# Altium schematic symbol library UCP.SchLib: 378 symbols (part 3 of 14)
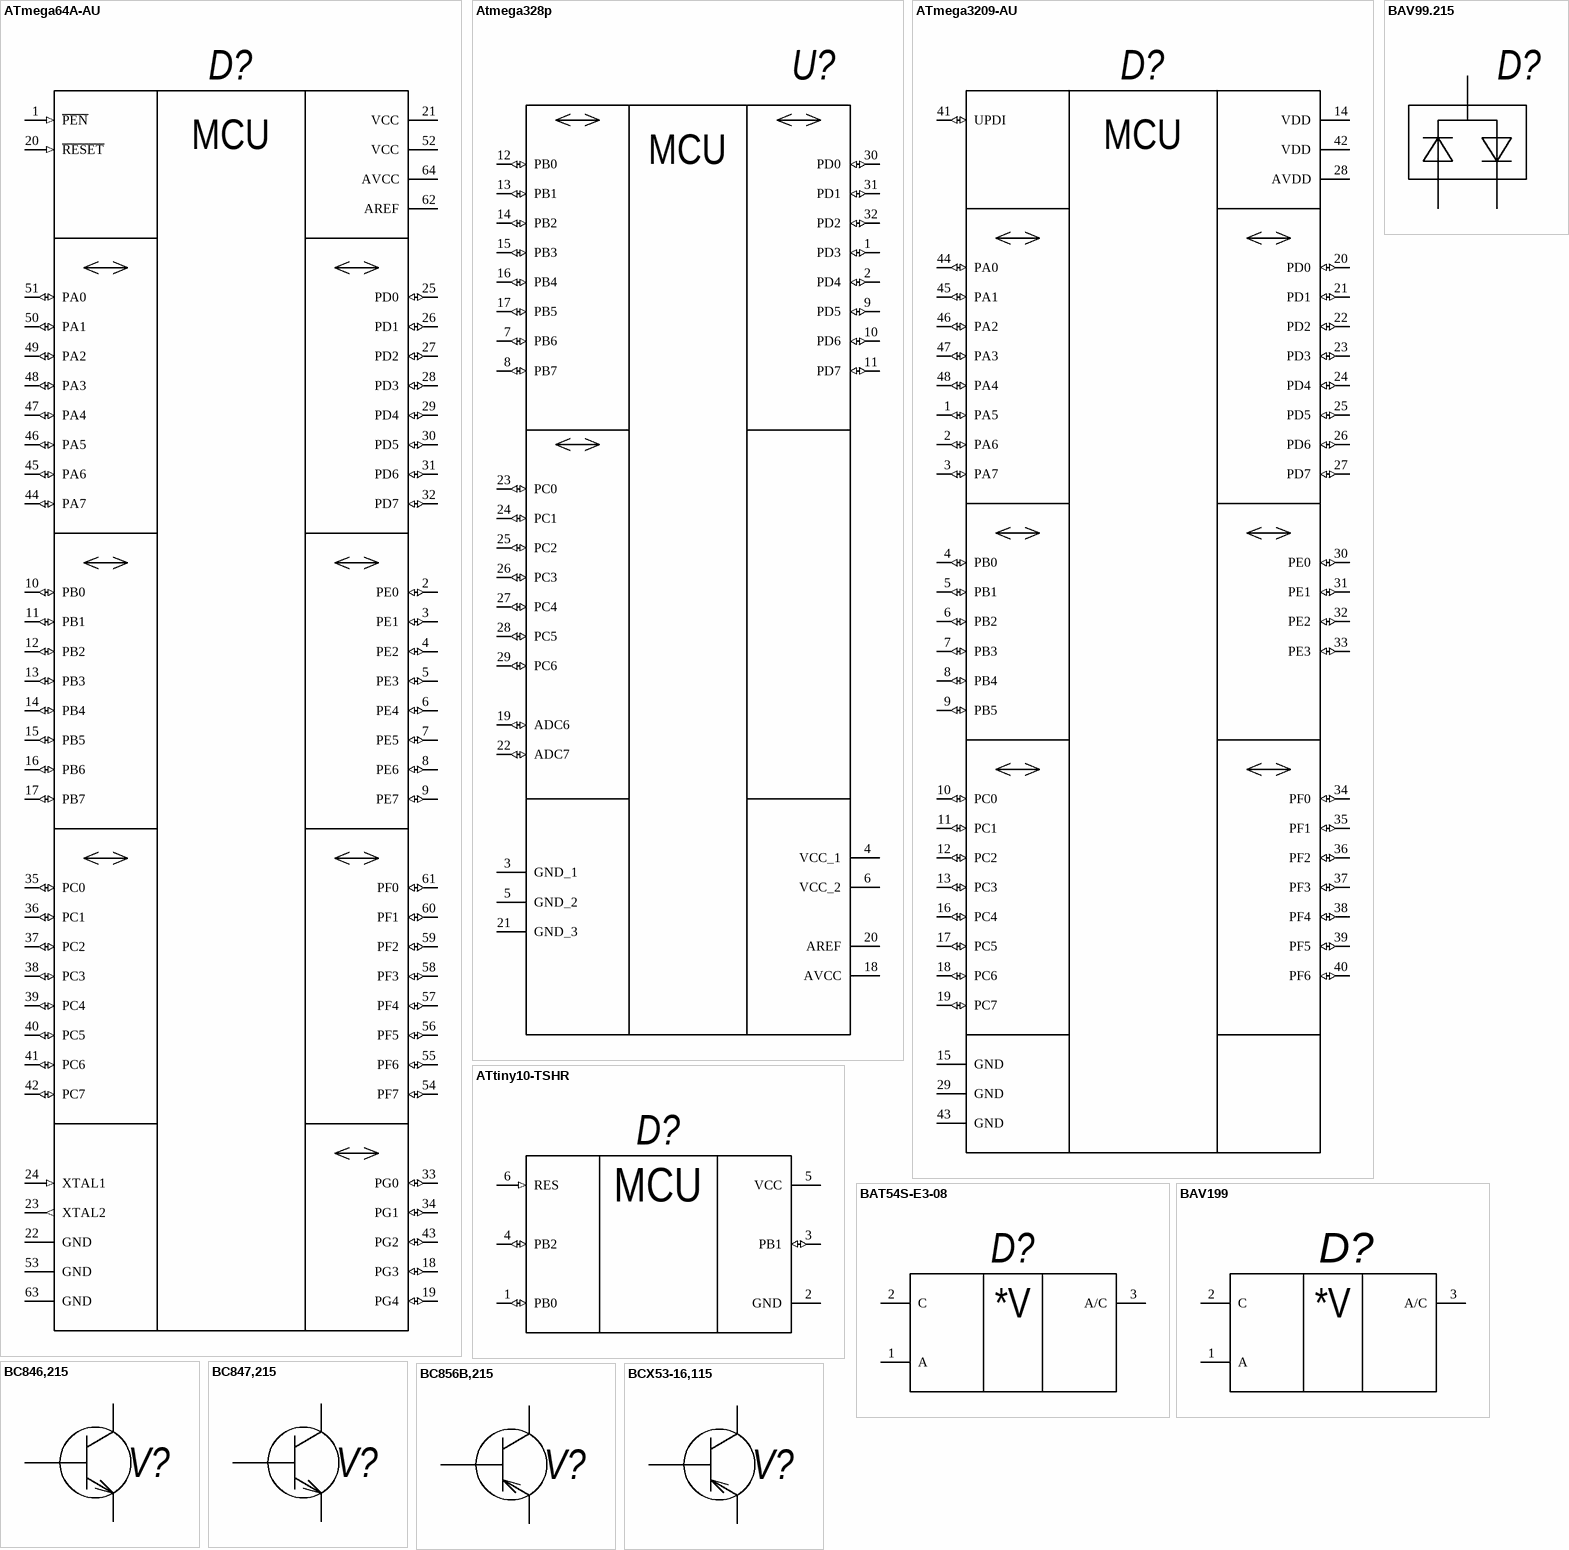
[diagram p26: symbols ATmega64A-AU to BCX53-16,115]

## BAV199
designator D?  (value not drawn)
Small Signal Diode, Dual Isolated, 85 V, 160 Ma, 1.1 V, 3 S, 4.5 A Rohs Compliant: Yes; Manufacturer 1: Infineon; Forward Current: 200mA; Max Repetitive Reverse Voltage (Vrrm): 75V; Reverse Recovery Time: 600ns; Forward Voltage: 1.1V; Max Power Dissipation: 330mW; Max Forward Surge Current (Ifsm): 4.5A; Breakdown Voltage: 85V; Type: Микросхема; Manufacturer Part Number 1: BAV199; RoHS: Yes; Category: Rectifier Diodes; Stock 1: 442765; Pricing 1: 3000=0,04602, 6000=0,04002, 15000=0,03480 (USD); Case/Package: SOT-23-3; Number of Pins: 3; Max Operating Temperature: 150°C; Packaging: Tape and Reel; Termination: SMD/SMT; Voltage: 85V; REACH SVHC: No SVHC; ComponentLink1URL: https://datasheet.ciiva.com/1180/48082-1180489.pdf?src-supplier=Element14; ComponentLink1Description: https://datasheet.ciiva.com/1180/48082-1180489.pdf?src-supplier=Element14; ComponentLink2URL: https://datasheet.ciiva.com/14174/qi600123-e-14174045.pdf?src-supplier=Distrelec; ComponentLink2Description: https://datasheet.ciiva.com/14174/qi600123-e-14174045.pdf?src-supplier=Distrelec; ComponentLink3URL: https://datasheet.ciiva.com/1180/23073-1180485.pdf?src-supplier=Element14; ComponentLink3Description: https://datasheet.ciiva.com/1180/23073-1180485.pdf?src-supplier=Element14; Supplier 1: Digi-Key; Supplier Part Number 1: BAV199E6327HTSA1CT-ND; Mount: SMT; Value: BAV199
footprint SOT23-3P95_240X110L25X60N (Small Outline Transistor (SOT23), 0.95 mm pitch; 3 pin, 2.90 mm L X 1.30 mm W X 1.10 mm H body)
footprint SOT23-3P95_240X110L30X43N (Small Outline Transistor (SOT23), 0.95 mm pitch; 3 pin, 2.90 mm L X 1.30 mm W X 1.10 mm H body)
pins: 1 A, 2 C, 3 A/C
text: *V

## BC846,215
designator V?  (value not drawn)
BC846 Series 65 V 100 mA SMT NPN General Purpose Transistor - SOT-23; Manufacturer 1: Nexperia; Supplier 1: RSComponents; Manufacturer Part Number 1: BC846,215; RoHS: Yes; Category: BJTs; Stock 1: 1; Pricing 1: 50=0,14700, 100=0,04900, 250=0,04800, 500=0,04500, 1000=0,03200 (USD); RoHS Compliant: Yes; ComponentLink1URL: http://www.farnell.com/datasheets/1699731.pdf?src-supplier=Farnell; ComponentLink1Description: http://www.farnell.com/datasheets/1699731.pdf?src-supplier=Farnell; ComponentLink2URL: https://assets.nexperia.com/documents/data-sheet/BC846_SER.pdf?src-supplier=Digi-Key; ComponentLink2Description: https://assets.nexperia.com/documents/data-sheet/BC846_SER.pdf?src-supplier=Digi-Key; Supplier Part Number 1: 4842268; Case/Package: SOT-23-3; Mount: SMT; Type: Транзистор; Value: BC846
footprint SOT23-3P95_240X110L25X60N (Small Outline Transistor (SOT23), 0.95 mm pitch; 3 pin, 2.90 mm L X 1.30 mm W X 1.10 mm H body)
footprint SOT23-3P95_240X110L30X43N (Small Outline Transistor (SOT23), 0.95 mm pitch; 3 pin, 2.90 mm L X 1.30 mm W X 1.10 mm H body)
pins: 1 B, 2 E, 3 C

## BC847,215
designator V?, comment BC847  (value not drawn)
TRANS NPN 45V 0.1A SOT23; Manufacturer 1: Nexperia; Manufacturer Part Number 1: BC847,215; RoHS: Yes; Category: BJTs; Stock 1: 1; Pricing 1: 50=0,13300 (USD); RoHS Compliant: Yes; ComponentLink1URL: http://www.farnell.com/datasheets/1699731.pdf?src-supplier=Farnell; ComponentLink1Description: http://www.farnell.com/datasheets/1699731.pdf?src-supplier=Farnell; ComponentLink2URL: https://assets.nexperia.com/documents/data-sheet/BC846_SER.pdf?src-supplier=Digi-Key; ComponentLink2Description: https://assets.nexperia.com/documents/data-sheet/BC846_SER.pdf?src-supplier=Digi-Key; Supplier 1: RSComponents; Supplier Part Number 1: 4367953; ComponentLink3URL: http://www.farnell.com/datasheets/1856333.pdf?src-supplier=Farnell; ComponentLink3Description: http://www.farnell.com/datasheets/1856333.pdf?src-supplier=Farnell; ComponentLink4URL: https://assets.nexperia.com/documents/data-sheet/BC847_SER.pdf?src-supplier=Digi-Key; ComponentLink4Description: https://assets.nexperia.com/documents/data-sheet/BC847_SER.pdf?src-supplier=Digi-Key; ComponentLink5URL: http://www.farnell.com/datasheets/1856333.pdf?src-supplier=Newark; ComponentLink5Description: http://www.farnell.com/datasheets/1856333.pdf?src-supplier=Newark; ComponentLink6URL: http://www.farnell.com/datasheets/1856333.pdf?src-supplier=Element14; ComponentLink6Description: http://www.farnell.com/datasheets/1856333.pdf?src-supplier=Element14; Case/Package: SOT-23-3; Mount: SMT; Type: Транзистор; Value: BC847
footprint SOT23-3P95_240X110L25X60N (Small Outline Transistor (SOT23), 0.95 mm pitch; 3 pin, 2.90 mm L X 1.30 mm W X 1.10 mm H body)
footprint SOT23-3P95_240X110L30X43N (Small Outline Transistor (SOT23), 0.95 mm pitch; 3 pin, 2.90 mm L X 1.30 mm W X 1.10 mm H body)
pins: 1 B, 2 E, 3 C

## BC856B,215
designator V?  (value not drawn)
Transistor General Purpose BJT PNP 65 Volt 0.2 Amp 3-Pin TO-236AB Tape and Reel; Manufacturer 1: Nexperia USA; Value: BC856; Supplier 1: Mouser; Manufacturer Part Number 1: BC856B,215; RoHS: No; Category: BJTs; Stock 1: 11364; Pricing 1: 1=0,13000, 10=0,11000, 50=0,11000, 100=0,06000, 500=0,03900, 1000=0,02700, 3000=0,02100, 10000=0,02100 (USD); ComponentLink1URL: https://assets.nexperia.com/documents/data-sheet/BC856_BC857_BC858.pdf?src-supplier=Digi-Key; ComponentLink1Description: https://assets.nexperia.com/documents/data-sheet/BC856_BC857_BC858.pdf?src-supplier=Digi-Key; Supplier Part Number 1: 771-BC856B-T/R; Case/Package: SOT-23-3; Mount: SMT; Type: Транзистор
footprint SOT23-3P95_240X110L25X60N (Small Outline Transistor (SOT23), 0.95 mm pitch; 3 pin, 2.90 mm L X 1.30 mm W X 1.10 mm H body)
footprint SOT23-3P95_240X110L30X43N (Small Outline Transistor (SOT23), 0.95 mm pitch; 3 pin, 2.90 mm L X 1.30 mm W X 1.10 mm H body)
pins: 1 B, 2 E, 3 C

## BCX53-16,115
designator V?  (value not drawn)
PNP Ic=-1A Vceo=-80V hfe=100~250 P=500mW; Manufacturer 1: Nexperia; Value: BCX53; Supplier 1: RSComponents; Supplier Part Number 1: 4368013; Manufacturer Part Number 1: BCX53-16,115; RoHS: Yes; Category: BJTs; Stock 1: 360; Pricing 1: 10=0,41900, 20=0,26800, 50=0,25900, 100=0,18400, 200=0,17600 (USD); RoHS Compliant: Yes; ComponentLink1URL: https://assets.nexperia.com/documents/data-sheet/BCP53_BCX53_BC53PA.pdf?src-supplier=Digi-Key; ComponentLink1Description: https://assets.nexperia.com/documents/data-sheet/BCP53_BCX53_BC53PA.pdf?src-supplier=Digi-Key; ComponentLink2URL: http://www.farnell.com/datasheets/1499214.pdf?src-supplier=Newark; ComponentLink2Description: http://www.farnell.com/datasheets/1499214.pdf?src-supplier=Newark; Case/Package: SOT-89; Mount: SMT; Type: Транзистор
footprint SOT89R-150P350X160-3N (SOT89, 3-Leads, Body 4,50x2,50mm, Pitch 1,50mm, Lead Span 3,5mm - Reverse Pinning, IPC Medium Density)
pins: 1 E, 2 C, 3 B

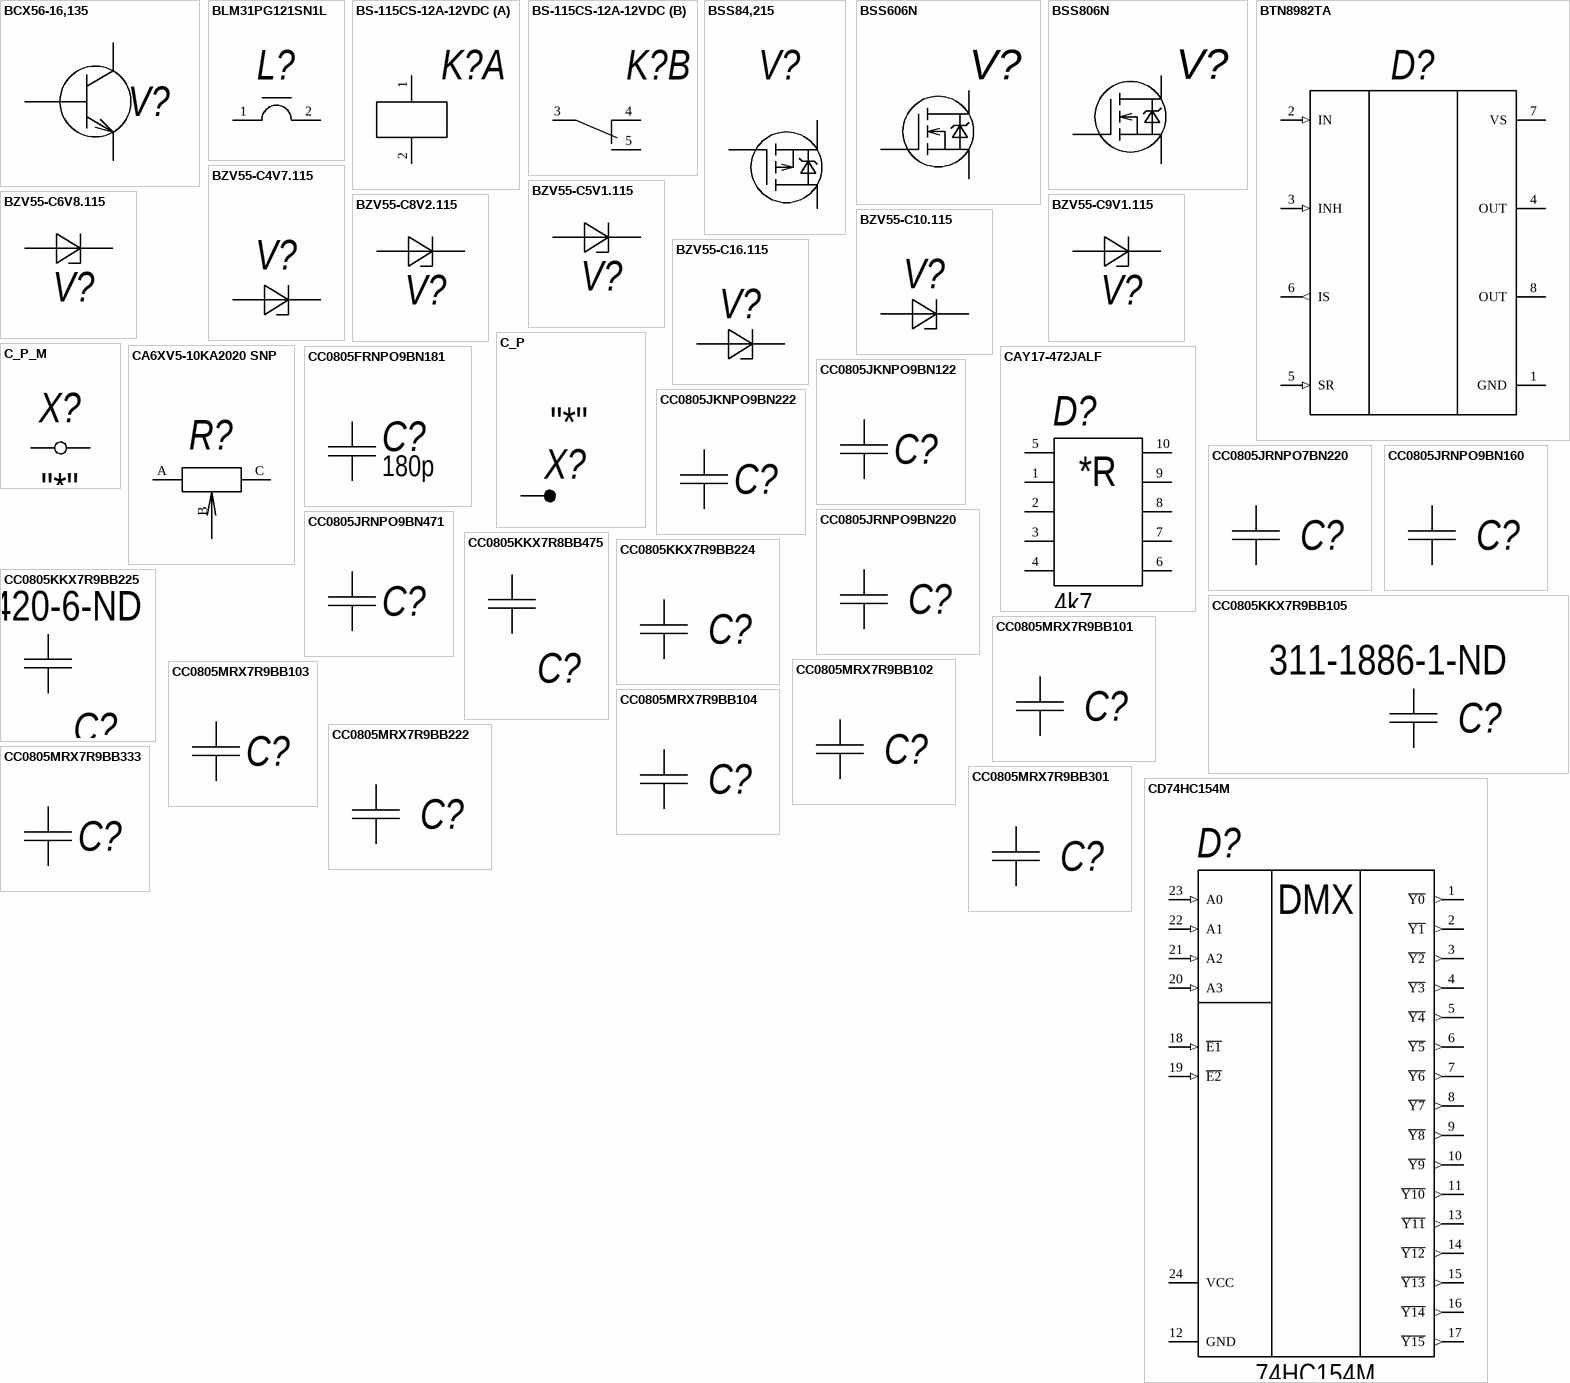
[diagram p6: symbols BCX56-16,135 to CD74HC154M]

## BCX56-16,135
designator V?  (value not drawn)
TRANS NPN 80V 1A SOT89; Manufacturer 1: Nexperia; Value: BCX56; Supplier 1: Digi-Key; Manufacturer Part Number 1: BCX56-16,135; RoHS: Yes; Category: BJTs; Stock 1: 2080; Pricing 1: 1=0,39000, 10=0,29200, 100=0,18170, 500=0,12430, 1000=0,09561, 2000=0,08605 (USD); ComponentLink1URL: https://assets.nexperia.com/documents/data-sheet/BCP56_BCX56_BC56PA.pdf?src-supplier=Digi-Key; ComponentLink1Description: https://assets.nexperia.com/documents/data-sheet/BCP56_BCX56_BC56PA.pdf?src-supplier=Digi-Key; Supplier Part Number 1: 1727-6389-1-ND; Case/Package: SOT-89; Mount: SMT; Type: Транзистор
footprint SOT89R-150P350X160-3N (SOT89, 3-Leads, Body 4,50x2,50mm, Pitch 1,50mm, Lead Span 3,5mm - Reverse Pinning, IPC Medium Density)
pins: 1 E, 2 C, 3 B

## BLM31PG121SN1L
designator L?  (value not drawn)
Ferrite Beads Multi-Layer 120Ohm 25% 100MHz 3.5A 20mOhm DCR 1206 T/R; Material: Steel,Ferrite; Impedance: 120R; Number of Lines: 1; DC Resistance (DCR): 20mR; Max DC Current: 3A; Shielding: Unshielded; Value: FB1206; Type: Бусина ферритовая; Supplier 1: Digi-Key; Supplier Part Number 1: 732-1622-1-ND; Supplier 2: Farnell; Supplier Part Number 2: 2672838; Manufacturer 2: Murata; Manufacturer Part Number 2: BLM31PG121SN1L; RoHS 2: Yes; Category: Ferrite Beads and Chips; Stock 2: 408; Pricing 2: 5=0,23000, 50=0,14800, 250=0,12200, 500=0,09600, 1500=0,09450, 3000=0,09300, 15000=0,09110 (EUR); Case/Package: 1206; Number of Pins: 2; Core Material: Ferrite; Case Code (Metric): 3216; Case Code (Imperial): 1206; Contact Plating: Tin,Matte; Min Operating Temperature: -55°C; Max Operating Temperature: 125°C; Package Quantity: 3000; Tolerance: 25%; Max Current Rating: 3.5A; Packaging: Tape and Reel; Current Rating: 3.5A; Termination: SMD/SMT; Test Frequency: 100MHz; DC Current: 3A; Frequency: 100MHz; Length: 3.2mm; Width: 1.6mm; Height: 1.1mm; Depth: 1.6mm; Radiation Hardening: No; Military Standard: Not; Lead Free: Lead Free; RoHS Compliant: Yes; ComponentLink1URL: https://datasheet.ciiva.com/19460/1845419-19460234.pdf?src-supplier=Jameco; ComponentLink1Description: https://datasheet.ciiva.com/19460/1845419-19460234.pdf?src-supplier=Jameco; ComponentLink2URL: https://datasheet.ciiva.com/1012/l0132s0193blm31p-1012992.pdf?src-supplier=Digi-Key; ComponentLink2Description: https://datasheet.ciiva.com/1012/l0132s0193blm31p-1012992.pdf?src-supplier=Digi-Key; ComponentLink3URL: https://datasheet.ciiva.com/11799/0900766b811b5866-11799444.pdf?src-supplier=RSComponents; ComponentLink3Description: https://datasheet.ciiva.com/11799/0900766b811b5866-11799444.pdf?src-supplier=RSComponents; ComponentLink4URL: https://datasheet.ciiva.com/3081/l0110s0100blm31p-3081665.pdf?src-supplier=Avnet; ComponentLink4Description: https://datasheet.ciiva.com/3081/l0110s0100blm31p-3081665.pdf?src-supplier=Avnet; ComponentLink5URL: https://datasheet.ciiva.com/41449/001172383-da-01-en-drossel-1206-120r-3-2x1-60mm-3000st-41449554.pdf?src-supplier=Conrad; ComponentLink5Description: https://datasheet.ciiva.com/41449/001172383-da-01-en-drossel-1206-120r-3-2x1-60mm-3000st-41449554.pdf?src-supplier=Conrad; ComponentLink6URL: https://datasheet.ciiva.com/29348/442557-da-01-en-chip-drossel-1206-120r-3000ma-3-2x1-60mm-29348014.pdf?src-supplier=Conrad; ComponentLink6Description: https://datasheet.ciiva.com/29348/442557-da-01-en-chip-drossel-1206-120r-3000ma-3-2x1-60mm-29348014.pdf?src-supplier=Conrad; ComponentLink7URL: https://datasheet.ciiva.com/14122/apblm31p-data-e-14122856.pdf?src-supplier=Distrelec; ComponentLink7Description: https://datasheet.ciiva.com/14122/apblm31p-data-e-14122856.pdf?src-supplier=Distrelec; ComponentLink8URL: https://datasheet.ciiva.com/48436/blm31pg121sn1l-eng-tds-48436731.pdf?src-supplier=Distrelec; ComponentLink8Description: https://datasheet.ciiva.com/48436/blm31pg121sn1l-eng-tds-48436731.pdf?src-supplier=Distrelec; ComponentLink9URL: https://datasheet.ciiva.com/1012/l0110s0100blm31p-1012991.pdf?src-supplier=Digi-Key; ComponentLink9Description: https://datasheet.ciiva.com/1012/l0110s0100blm31p-1012991.pdf?src-supplier=Digi-Key; ComponentLink10URL: https://datasheet.ciiva.com/1012/l0110s0100blm31p-1012993.pdf?src-supplier=Digi-Key; ComponentLink10Description: https://datasheet.ciiva.com/1012/l0110s0100blm31p-1012993.pdf?src-supplier=Digi-Key; ComponentLink11URL: https://datasheet.ciiva.com/3081/l0110s0100blm31p-3081666.pdf?src-supplier=Avnet; ComponentLink11Description: https://datasheet.ciiva.com/3081/l0110s0100blm31p-3081666.pdf?src-supplier=Avnet; ComponentLink12URL: https://datasheet.ciiva.com/16390/l0110s0100blm31p-16390857.pdf?src-supplier=Future+Electronics; ComponentLink12Description: https://datasheet.ciiva.com/16390/l0110s0100blm31p-16390857.pdf?src-supplier=Future+Electronics; ComponentLink13URL: https://datasheet.ciiva.com/18093/getdatasheetpartid-152966-18093084.pdf?src-supplier=Verical; ComponentLink13Description: https://datasheet.ciiva.com/18093/getdatasheetpartid-152966-18093084.pdf?src-supplier=Verical; Mount: SMT
footprint INDC320X160X130L50
pins: 1 "Назначение вывода", 2 "Назначение вывода"

## BS-115CS-12A-12VDC
designator K?  (value not drawn)
Описание свойств компонента; Value: BS-115; Case/Package: DIP-5; Mount: THT; Type: Реле
footprint BESTAR_BS115C
part A pins: 1 3 "Вывод обмотки", 2 "Вывод обмотки"
part B pins: 3 "Назначение вывода", 4 "NC", 5 "NO"

## BSS84,215
designator V?  (value not drawn)
MOSFET P-CH 50V 130MA SOT-23; Manufacturer 1: Nexperia; Supplier 1: RSComponents; Supplier Part Number 1: 1661248; Manufacturer Part Number 1: BSS84,215; RoHS: Yes; Category: MOSFETs; Stock 1: 132000; Pricing 1: 3000=0,07200, 6000=0,07100, 9000=0,07000 (USD); RoHS Compliant: Yes; ComponentLink1URL: http://www.farnell.com/datasheets/301708.pdf?src-supplier=Farnell; ComponentLink1Description: http://www.farnell.com/datasheets/301708.pdf?src-supplier=Farnell; ComponentLink2URL: http://www.farnell.com/datasheets/301708.pdf?src-supplier=Newark; ComponentLink2Description: http://www.farnell.com/datasheets/301708.pdf?src-supplier=Newark; Case/Package: SOT-23-3; Mount: SMT; Type: Транзистор; Value: BSS84
footprint SOT23-3P95_240X110L25X60N (Small Outline Transistor (SOT23), 0.95 mm pitch; 3 pin, 2.90 mm L X 1.30 mm W X 1.10 mm H body)
footprint SOT23-3P95_240X110L30X43N (Small Outline Transistor (SOT23), 0.95 mm pitch; 3 pin, 2.90 mm L X 1.30 mm W X 1.10 mm H body)
pins: 1 G, 2 S, 3 D

## BSS606N
designator V?  (value not drawn)
N-Channel 60 V 3.2 A 1 W Surface Mount OptiMOS Small-Signal-Transistor - SOT-89; Manufacturer 1: Infineon; Manufacturer Part Number 1: BSS606NH6327XTSA1; Drain to Source Voltage (Vdss): 60V; Rds On Max: 60mR; Continuous Drain Current (ID): 3.2A; Max Power Dissipation: 1W; Input Capacitance: 657pF; Number of Elements: 1; Element Configuration: Single; Gate to Source Voltage (Vgs): 20V; Value: BSS606; Supplier 1: RSComponents; RoHS: Yes; Category: MOSFETs; Stock 1: 1; Pricing 1: 50=0,51400, 100=0,32100, 500=0,30400, 1000=0,24000, 2500=0,21100 (USD); Mount: SMT; Case/Package: SOT-89; Number of Pins: 4; Min Operating Temperature: -55°C; Max Operating Temperature: 150°C; Packaging: Tape and Reel; Max Dual Supply Voltage: 60V; Package Quantity: 1000; Drain to Source Resistance: 60mR; Power Dissipation: 1W; RoHS Compliant: Yes; Halogen Free: Halogen Free; Lead Free: Lead Free; ComponentLink1URL: https://datasheet.ciiva.com/16385/infineon20-20product20brochure20-20powermosfets-20small20-245457-16385874.pdf?src-supplier=Mouser; ComponentLink1Description: https://datasheet.ciiva.com/16385/infineon20-20product20brochure20-20powermosfets-20small20-245457-16385874.pdf?src-supplier=Mouser; Type: Транзистор
footprint SOT89-150P350X160-3N (SOT89, 3-Leads, Body 4,50x2,50mm, Pitch 1,50mm, Lead Span 3,5mm , IPC Medium Density)
pins: 1 G, 2 D, 3 S

## BSS806N
designator V?  (value not drawn)
Single N-Channel 20 V 57 mOhm 1.7 nC OptiMOS Small Signal Mosfet - SOT-23; Manufacturer 1: Infineon; Continuous Drain Current (ID): 2.3A; Max Power Dissipation: 500mW; Input Capacitance: 370pF; Rds On Max: 57mR; Drain to Source Voltage (Vdss): 20V; Gate to Source Voltage (Vgs): 8V; Turn-On Delay Time: 7.5ns; Turn-Off Delay Time: 12ns; Supplier 1: Digi-Key; Manufacturer Part Number 1: BSS806N; RoHS: Yes; Stock 1: 85; Pricing 1: 1=0,46000, 10=0,34800, 100=0,21660, 500=0,14820, 1000=0,11400 (USD); Case/Package: SOT-23-3; Number of Pins: 3; Min Operating Temperature: -55°C; Max Operating Temperature: 150°C; Packaging: Tape and Reel; Element Configuration: Single; Max Dual Supply Voltage: 20V; Length: 2.9mm; Width: 1.3mm; Height: 1mm; RoHS Compliant: Yes; Halogen Free: Halogen Free; ComponentLink1URL: http://uk.rs-online.com/webdocs/1329/0900766b81329f35.pdf?src-supplier=RSComponents; ComponentLink1Description: http://uk.rs-online.com/webdocs/1329/0900766b81329f35.pdf?src-supplier=RSComponents; Mount: SMT; Type: Транзистор; Value: BSS806N
footprint SOT23-3P95_240X110L25X60N (Small Outline Transistor (SOT23), 0.95 mm pitch; 3 pin, 2.90 mm L X 1.30 mm W X 1.10 mm H body)
footprint SOT23-3P95_240X110L30X43N (Small Outline Transistor (SOT23), 0.95 mm pitch; 3 pin, 2.90 mm L X 1.30 mm W X 1.10 mm H body)
pins: 1 G, 2 S, 3 D

## BTN8982TA
designator D?, comment BTN8982TAAUMA1  (value not drawn)
H-Bridge Motor Driver 5.5V to 40V 7-Pin TO-263 T/R; Manufacturer 1: Infineon; Number of Outputs: 1; Quiescent Current: 7uA; Type: Микросхема; Value: 8982; Supplier 1: RSComponents; Supplier Part Number 1: 9063085; Manufacturer Part Number 1: BTN8982TA; RoHS: Yes; Description 1: H-Bridge Motor Driver 5.5V to 40V 7-Pin TO-263 T/R; Category: Motor Drivers; Stock 1: 1; Pricing 1: 2=7,09900, 10=6,54300, 50=6,00100, 250=5,43900, 500=4,89700, 2=5,11000, 10=4,71000, 50=4,32000, 250=3,91500, 500=3,52500 (USD); Mount: SMT; Case/Package: TO-263-7; Number of Pins: 7; Packaging: Tape and Reel; Halogen Free: Halogen Free; REACH SVHC: No SVHC; RoHS Compliant: Yes
footprint DPAK8P127_1500X440L270X60T755X1020 (DPAK, 1.27 mm pitch; 8 pin, 9.25 mm L X 10.00 mm W X 4.40 mm H body)
pins: 1 GND (power) "Ground", 2 IN (in) "Input (Defines whether high- or lowside switch is activated)", 3 INH (in) "Inhibit (When set to low device goes in sleep mode)", 4 OUT "Power output of the bridge", 5 SR (in) "Slew Rate (The slew rate of the power switches can be adjusted by connecting a resistor between SR and GND)", 6 IS (out) "Current Sense and Diagnostics", 7 VS (power) "Supply", 8 OUT "Power output of the bridge"

## BZV55-C4V7.115
designator V?  (value not drawn)
Voltage regulator diodes Vst = 4,7 V 0,5W; Value: 4V1; Supplier 1: Digi-Key; Supplier 2: Digi-Key; Supplier Part Number 1: 1727-4972-1-ND; Supplier Part Number 2: 1727-4954-1-ND; Case/Package: SOD-80; Mount: SMT; Type: Стабилитрон
footprint DIOMELF350X164L52N (Diode, Metal Electrode Leadless Face (MELF); 3.50 mm L X 1.645 mm Dia body)
pins: A, C

## BZV55-C5V1.115
designator V?  (value not drawn)
Voltage regulator diodes Vst = 5,1 V 0,5W; Value: 5V1; Supplier 1: Digi-Key; Supplier 2: Digi-Key; Supplier Part Number 2: 1727-4247-1-ND; Supplier Part Number 1: 1727-4247-1-ND; Case/Package: SOD-80; Mount: SMT; Type: Стабилитрон
footprint DIOMELF350X164L52N (Diode, Metal Electrode Leadless Face (MELF); 3.50 mm L X 1.645 mm Dia body)
pins: A, C

## BZV55-C6V8.115
designator V?  (value not drawn)
Voltage regulator diodes Vst = 6,8 V 0,5W; Manufacturer 1: Philips; Manufacturer Part Number 1: BZV55-C6V8,115; Description 1: Diode Zener Single 6.8V 5% 500mW Automotive 2-Pin Mini-MELF T/R; Value: 6V8; Supplier 1: Arrow Electronics; Supplier Part Number 1: BZV55-C6V8,115; RoHS: No; Category: Zener Diodes; Number of Pins: 2; Packaging: Cut Tape; REACH SVHC: No SVHC; Lead Free: Lead Free; Supplier 2: Digi-Key; Supplier Part Number 2: 1727-4974-1-ND; Manufacturer 2: Nexperia; Manufacturer Part Number 2: BZV55-C6V8,115; Description 2: Diode Zener Single 6.8V 5% 500mW Automotive 2-Pin Mini-MELF T/R; Stock 2: 32616; Pricing 2: 1=0,19000, 10=0,17500, 100=0,09520, 500=0,05856, 1000=0,03993 (USD); RoHS Compliant: Yes; ComponentLink1URL: http://www.farnell.com/datasheets/1498690.pdf?src-supplier=Farnell; ComponentLink1Description: http://www.farnell.com/datasheets/1498690.pdf?src-supplier=Farnell; Case/Package: SOD-80; Mount: SMT; Type: Стабилитрон
footprint DIOMELF350X164L52N (Diode, Metal Electrode Leadless Face (MELF); 3.50 mm L X 1.645 mm Dia body)
pins: A, C

## BZV55-C8V2.115
designator V?  (value not drawn)
Zener Diode Single 8.2V 5% 15Ohm 500mW 2-Pin Mini-MELF T/R; Manufacturer 1: Nexperia; Manufacturer Part Number 1: BZV55-C8V2,115; Description 1: Diode Zener Single 6.8V 5% 500mW Automotive 2-Pin Mini-MELF T/R; Value: 8V2; RoHS: No; Category: Zener Diodes; Number of Pins: 2; Packaging: Cut Tape; REACH SVHC: No SVHC; Lead Free: Lead Free; Manufacturer 2: Nexperia; Manufacturer Part Number 2: BZV55-C6V8,115; Description 2: Diode Zener Single 6.8V 5% 500mW Automotive 2-Pin Mini-MELF T/R; Stock 2: 32616; Pricing 2: 1=0,19000, 10=0,17500, 100=0,09520, 500=0,05856, 1000=0,03993 (USD); RoHS Compliant: Yes; ComponentLink1URL: http://www.farnell.com/datasheets/1498690.pdf?src-supplier=Farnell; ComponentLink1Description: http://www.farnell.com/datasheets/1498690.pdf?src-supplier=Farnell; Supplier 1: Digi-Key; Stock 1: 1883; Pricing 1: 1=0,22000, 10=0,19900, 100=0,10850, 500=0,06680, 1000=0,04554 (USD); ComponentLink2URL: https://assets.nexperia.com/documents/data-sheet/BZV55_SER.pdf?src-supplier=Digi-Key; ComponentLink2Description: https://assets.nexperia.com/documents/data-sheet/BZV55_SER.pdf?src-supplier=Digi-Key; Supplier Part Number 1: 1727-4977-1-ND; Case/Package: SOD-80; Mount: SMT; Type: Стабилитрон
footprint DIOMELF350X164L52N (Diode, Metal Electrode Leadless Face (MELF); 3.50 mm L X 1.645 mm Dia body)
pins: A, C

## BZV55-C9V1.115
designator V?  (value not drawn)
Voltage regulator diodes Vst = 9,1 V 0,5W; Manufacturer 1: Nexperia; Manufacturer Part Number 1: BZV55-C9V1,115; Description 1: Zener Diode Single 9.05V 5% 15Ohm 500mW 2-Pin Mini-MELF T/R; Value: 9V1; ComponentLink1URL: http://www.farnell.com/datasheets/1498690.pdf?src-supplier=Farnell; ComponentLink1Description: http://www.farnell.com/datasheets/1498690.pdf?src-supplier=Farnell; Supplier 1: Digi-Key; Supplier Part Number 1: 1727-4978-1-ND; RoHS: Yes; Stock 1: 362; Pricing 1: 1=0,19000, 10=0,17500, 100=0,09520, 500=0,05856, 1000=0,03993 (USD); RoHS Compliant: Yes; Case/Package: SOD-80; Mount: SMT; Type: Стабилитрон
footprint DIOMELF350X164L52N (Diode, Metal Electrode Leadless Face (MELF); 3.50 mm L X 1.645 mm Dia body)
pins: A, C

## BZV55-C10.115
designator V?  (value not drawn)
Voltage regulator diodes Vst = 10 V 0,5W; Manufacturer 1: Nexperia; Manufacturer Part Number 1: BZV55-C10,115; Value: 10V; Supplier 1: Digi-Key; Supplier 2: Arrow Electronics; Supplier Part Number 1: 1727-4959-1-ND; Supplier Part Number 2: BZV55-B10,115; RoHS: Yes; Category: Zener Diodes; Stock 1: 1398; Pricing 1: 1=0,19000, 10=0,17500, 100=0,09520, 500=0,05856, 1000=0,03993 (USD); RoHS Compliant: Yes; ComponentLink1URL: http://www.farnell.com/datasheets/1498690.pdf?src-supplier=Farnell; ComponentLink1Description: http://www.farnell.com/datasheets/1498690.pdf?src-supplier=Farnell; ComponentLink2URL: https://assets.nexperia.com/documents/data-sheet/BZV55_SER.pdf?src-supplier=Digi-Key; ComponentLink2Description: https://assets.nexperia.com/documents/data-sheet/BZV55_SER.pdf?src-supplier=Digi-Key; Case/Package: SOD-80; Mount: SMT; Type: Стабилитрон
footprint DIOMELF350X164L52N (Diode, Metal Electrode Leadless Face (MELF); 3.50 mm L X 1.645 mm Dia body)
pins: A, C

## BZV55-C16.115
designator V?  (value not drawn)
Voltage regulator diodes Vst = 16 V 0,5W; Manufacturer 1: Nexperia; Manufacturer Part Number 1: BZV55-C16,115; Value: 16V; Supplier 1: Digi-Key; Supplier 2: Digi-Key; Supplier Part Number 1: 1727-4963-1-ND; Supplier Part Number 2: 1727-4949-1-ND; RoHS: Yes; Category: Zener Diodes; Stock 1: 10451; Pricing 1: 1=0,19000, 10=0,17500, 100=0,09520, 500=0,05856, 1000=0,03993 (USD); RoHS Compliant: Yes; ComponentLink1URL: https://assets.nexperia.com/documents/data-sheet/BZV55_SER.pdf?src-supplier=Digi-Key; ComponentLink1Description: https://assets.nexperia.com/documents/data-sheet/BZV55_SER.pdf?src-supplier=Digi-Key; Case/Package: SOD-80; Mount: SMT; Type: Стабилитрон
footprint DIOMELF350X164L52N (Diode, Metal Electrode Leadless Face (MELF); 3.50 mm L X 1.645 mm Dia body)
pins: A, C

## C_P
designator X?  Marck-2: "*"  (hidden comment: C_P)  (no BOM)
Контрольная площадка; Value: 0; Marck-1: *; Case/Package: SMD-1; Mount: SMT; Type: Точка контрольная
footprint C_P
pins: 1

## C_P_M
designator X?  Marck-2: "*"  (hidden comment: C_P_M)  (no BOM)
Контрольная площадка винтовая; Value: 0; Marck-1: *; Case/Package: PIN-1; Mount: THT; Type: Точка контрольная
pins: 1

## CA6XV5-10KA2020 SNP
designator R?  (value not drawn)
Потенциометр 10 кОм; Value: 10k; Case/Package: DIP-3; Mount: THT; Type: Резистор переменный
footprint CA6XV5-10KA2020 SNP
pins: A, B, C

## CAY17-472JALF
designator D?  value 4k7  (hidden comment: CAY17-472JALF)
Резистивная матрица 8 резисторов на общий вывод 4,7 кОм ±5%; Type: Микросхема; Case/Package: 1206; Mount: SMT; Supplier 1: Farnell; Supplier Part Number 1: 2321753
footprint RESCAXS10P64_320X160X60L30X35N (Resistor, Chip Array, 2 Side Convex, 0.64 mm pitch; 10 pin, 3.20 mm L X 1.60 mm W X 0.50 mm H body)
pins: 1 R1 "Назначение вывода", 2 R2 "Назначение вывода", 3 R3 "Назначение вывода", 4 R4 "Назначение вывода", 5 COM "Общий вывод", 6 R5 "Назначение вывода", 7 R6 "Назначение вывода", 8 R7 "Назначение вывода", 9 R8 "Назначение вывода", 10 COM "Общий вывод"
text: *R

## CC0805FRNPO9BN181
designator C?  value 180p  (hidden comment: CC0805FRNPO9BN181)
Cap Ceramic 180pF 50V C0G 1% Pad SMD 0805 125C T/R; Tolerance: 5%; Type: Конденсатор; Mount: SMT; Case/Package: 0805; Max Operating Temperature: 125°C; Capacitance: 180pF; Dielectric: C0G; ComponentLink1URL: https://datasheet.ciiva.com/144/mlccorderingcode-144745.pdf?src-supplier=Digi-Key; ComponentLink1Description: https://datasheet.ciiva.com/144/mlccorderingcode-144745.pdf?src-supplier=Digi-Key; ComponentLink2URL: https://datasheet.ciiva.com/8033/1734582-8033931.pdf?src-supplier=Element14; ComponentLink2Description: https://datasheet.ciiva.com/8033/1734582-8033931.pdf?src-supplier=Element14; ComponentLink3URL: https://datasheet.ciiva.com/8033/1734582-8033933.pdf?src-supplier=Element14; ComponentLink3Description: https://datasheet.ciiva.com/8033/1734582-8033933.pdf?src-supplier=Element14; ComponentLink4URL: https://datasheet.ciiva.com/144/mlccorderingcode-144746.pdf?src-supplier=Digi-Key; ComponentLink4Description: https://datasheet.ciiva.com/144/mlccorderingcode-144746.pdf?src-supplier=Digi-Key; ComponentLink5URL: https://datasheet.ciiva.com/144/mlccorderingcode-144747.pdf?src-supplier=Digi-Key; ComponentLink5Description: https://datasheet.ciiva.com/144/mlccorderingcode-144747.pdf?src-supplier=Digi-Key; ComponentLink6URL: https://datasheet.ciiva.com/26862/getdatasheetpartid-650908-26862902.pdf?src-supplier=Verical; ComponentLink6Description: https://datasheet.ciiva.com/26862/getdatasheetpartid-650908-26862902.pdf?src-supplier=Verical; ComponentLink7URL: https://datasheet.ciiva.com/13263/upy-gp-np0-16v-to-50v-8-3714-13263354.pdf?src-supplier=Mouser; ComponentLink7Description: https://datasheet.ciiva.com/13263/upy-gp-np0-16v-to-50v-8-3714-13263354.pdf?src-supplier=Mouser
footprint CAPC200X125X95L50N (Capacitor, Chip; 2.00 mm L X 1.25 mm W X 0.95 mm H body)
pins: 1, 2

## CC0805JKNPO9BN122
designator C?  (value not drawn)
Ceramic capacitor 0805 COG 1200pF 50V; Manufacturer 1: Yageo; Manufacturer Part Number 1: CC0805JKNPO9BN222; Description 1: Surface Mount Ceramic Multilayer Capacitor 0.033uF 20% X7R 50V 0805 Paper T/R; Tolerance: 5%; Capacitance: 2.2nF; Dielectric: C0G; Value: 1200p; Type: Конденсатор; ComponentLink1URL: https://datasheet.ciiva.com/13264/upy-gphc-x7r-6-3v-to-50v-8-12304-13264316.pdf?src-supplier=Mouser; ComponentLink1Description: https://datasheet.ciiva.com/13264/upy-gphc-x7r-6-3v-to-50v-8-12304-13264316.pdf?src-supplier=Mouser; RoHS: Yes; Category: Ceramic Capacitors; Pricing 1: 1=0,26000, 10=0,17900, 50=0,11920, 100=0,10130, 500=0,07152, 1000=0,06257 (USD); RoHS Compliant: Yes; Supplier 1: Digi-Key; Stock 1: 41820; Mount: SMT; Case/Package: 0805; Case Code (Imperial): 0805; Case Code (Metric): 2012; Weight: 0.000194oz; Min Operating Temperature: -55°C; Max Operating Temperature: 125°C; Packaging: Tape and Reel; Voltage Rating (DC): 50V; Voltage Rating: 50V; Termination: SMD/SMT; Resistor Type: Ceramic; Series: CC; Length: 2mm; Width: 0.049inch; Height: 1.25mm; Thickness: 0.057inch; Depth: 1.25mm; Radiation Hardening: No; Lead Free: Lead Free; ComponentLink2URL: https://datasheet.ciiva.com/17436/upy-gp-np0-16v-to-50v-8-17436694.pdf?src-supplier=Avnet+Europe; ComponentLink2Description: https://datasheet.ciiva.com/17436/upy-gp-np0-16v-to-50v-8-17436694.pdf?src-supplier=Avnet+Europe; ComponentLink3URL: https://datasheet.ciiva.com/11587/upy-gp-np0-16v-to-50v-8-11587259.pdf?src-supplier=Avnet; ComponentLink3Description: https://datasheet.ciiva.com/11587/upy-gp-np0-16v-to-50v-8-11587259.pdf?src-supplier=Avnet; Voltage: 50V
footprint CAPC200X125X95L50N (Capacitor, Chip; 2.00 mm L X 1.25 mm W X 0.95 mm H body)
pins: 1, 2

## CC0805JKNPO9BN222
designator C?  (value not drawn)
Ceramic capacitor 0805 COG 2200pF 50V; Manufacturer 1: Yageo; Description 1: Surface Mount Ceramic Multilayer Capacitor 0.033uF 20% X7R 50V 0805 Paper T/R; Tolerance: 5%; Capacitance: 2.2nF; Dielectric: C0G; Value: 2200p; Type: Конденсатор; ComponentLink1URL: https://datasheet.ciiva.com/13264/upy-gphc-x7r-6-3v-to-50v-8-12304-13264316.pdf?src-supplier=Mouser; ComponentLink1Description: https://datasheet.ciiva.com/13264/upy-gphc-x7r-6-3v-to-50v-8-12304-13264316.pdf?src-supplier=Mouser; Manufacturer Part Number 1: CC0805JKNPO9BN222; RoHS: Yes; Category: Ceramic Capacitors; Pricing 1: 1=0,26000, 10=0,17900, 50=0,11920, 100=0,10130, 500=0,07152, 1000=0,06257 (USD); RoHS Compliant: Yes; Supplier 1: Digi-Key; Stock 1: 41820; Mount: SMT; Case/Package: 0805; Case Code (Imperial): 0805; Case Code (Metric): 2012; Weight: 0.000194oz; Min Operating Temperature: -55°C; Max Operating Temperature: 125°C; Packaging: Tape and Reel; Voltage Rating (DC): 50V; Voltage Rating: 50V; Termination: SMD/SMT; Resistor Type: Ceramic; Series: CC; Length: 2mm; Width: 0.049inch; Height: 1.25mm; Thickness: 0.057inch; Depth: 1.25mm; Radiation Hardening: No; Lead Free: Lead Free; ComponentLink2URL: https://datasheet.ciiva.com/17436/upy-gp-np0-16v-to-50v-8-17436694.pdf?src-supplier=Avnet+Europe; ComponentLink2Description: https://datasheet.ciiva.com/17436/upy-gp-np0-16v-to-50v-8-17436694.pdf?src-supplier=Avnet+Europe; ComponentLink3URL: https://datasheet.ciiva.com/11587/upy-gp-np0-16v-to-50v-8-11587259.pdf?src-supplier=Avnet; ComponentLink3Description: https://datasheet.ciiva.com/11587/upy-gp-np0-16v-to-50v-8-11587259.pdf?src-supplier=Avnet; Voltage: 50V
footprint CAPC200X125X95L50N (Capacitor, Chip; 2.00 mm L X 1.25 mm W X 0.95 mm H body)
pins: 1, 2

## CC0805JRNPO7BN220
designator C?  (value not drawn)
Ceramic capacitor 0805 NPO 22pF 16V; Manufacturer 1: Yageo; Manufacturer Part Number 1: CC0805JRNPO9BN220; Tolerance: 5%; Dielectric: C0G; Voltage Rating: 50V; Value: 22p; Type: Конденсатор; Supplier 1: Digi-Key; Supplier Part Number 1: 311-1103-1-ND; RoHS: Yes; Category: Ceramic Capacitors; Stock 1: 117464; Pricing 1: 1=0,11000, 10=0,07800, 50=0,04280, 100=0,03490, 500=0,02492, 1000=0,01958 (USD); Mount: SMT; Case/Package: 0805; Number of Pins: 2; Case Code (Imperial): 0805; Case Code (Metric): 2012; Dielectric Material: Ceramic; Min Operating Temperature: -55°C; Max Operating Temperature: 125°C; Capacitance: 22pF; Voltage Rating (DC): 50V; Packaging: Tape and Reel; Package Quantity: 1; Termination: SMD/SMT; Resistor Type: Ceramic; Voltage: 50V; Series: CC; Construction: Flat; Length: 2mm; Width: 1.25mm; Height: 0.6mm; Depth: 1.25mm; Thickness: 0.024inch; Radiation Hardening: No; REACH SVHC: No SVHC; Lead Free: Lead Free; RoHS Compliant: Yes; ComponentLink1URL: https://datasheet.ciiva.com/144/mlccorderingcode-144745.pdf?src-supplier=Digi-Key; ComponentLink1Description: https://datasheet.ciiva.com/144/mlccorderingcode-144745.pdf?src-supplier=Digi-Key; ComponentLink2URL: https://datasheet.ciiva.com/8033/1734582-8033931.pdf?src-supplier=Element14; ComponentLink2Description: https://datasheet.ciiva.com/8033/1734582-8033931.pdf?src-supplier=Element14; ComponentLink3URL: https://datasheet.ciiva.com/8033/1734582-8033933.pdf?src-supplier=Element14; ComponentLink3Description: https://datasheet.ciiva.com/8033/1734582-8033933.pdf?src-supplier=Element14; ComponentLink4URL: https://datasheet.ciiva.com/144/mlccorderingcode-144746.pdf?src-supplier=Digi-Key; ComponentLink4Description: https://datasheet.ciiva.com/144/mlccorderingcode-144746.pdf?src-supplier=Digi-Key; ComponentLink5URL: https://datasheet.ciiva.com/144/mlccorderingcode-144747.pdf?src-supplier=Digi-Key; ComponentLink5Description: https://datasheet.ciiva.com/144/mlccorderingcode-144747.pdf?src-supplier=Digi-Key
footprint CAPC200X125X95L50N (Capacitor, Chip; 2.00 mm L X 1.25 mm W X 0.95 mm H body)
pins: 1, 2

## CC0805JRNPO9BN160
designator C?  (value not drawn)
Ceramic capacitor 0805 C0G 16pF 50V; Manufacturer 1: Yageo; Manufacturer Part Number 1: CC0805JRNPO9BN220; Tolerance: 5%; Value: 16p; Type: Конденсатор; Supplier 1: Digi-Key; Supplier Part Number 1: 311-1103-1-ND; RoHS: Yes; Category: Ceramic Capacitors; Stock 1: 117464; Pricing 1: 1=0,11000, 10=0,07800, 50=0,04280, 100=0,03490, 500=0,02492, 1000=0,01958 (USD); Mount: SMT; Case/Package: 0805; Number of Pins: 2; Case Code (Imperial): 0805; Case Code (Metric): 2012; Dielectric Material: Ceramic; Min Operating Temperature: -55°C; Max Operating Temperature: 125°C; Capacitance: 16pF; Dielectric: C0G; Voltage Rating: 50V; Voltage Rating (DC): 50V; Packaging: Tape and Reel; Package Quantity: 1; Termination: SMD/SMT; Resistor Type: Ceramic; Voltage: 50V; Series: CC; Construction: Flat; Length: 2mm; Width: 1.25mm; Height: 0.6mm; Depth: 1.25mm; Thickness: 0.024inch; Radiation Hardening: No; REACH SVHC: No SVHC; Lead Free: Lead Free; RoHS Compliant: Yes; ComponentLink1URL: https://datasheet.ciiva.com/144/mlccorderingcode-144745.pdf?src-supplier=Digi-Key; ComponentLink1Description: https://datasheet.ciiva.com/144/mlccorderingcode-144745.pdf?src-supplier=Digi-Key; ComponentLink2URL: https://datasheet.ciiva.com/8033/1734582-8033931.pdf?src-supplier=Element14; ComponentLink2Description: https://datasheet.ciiva.com/8033/1734582-8033931.pdf?src-supplier=Element14; ComponentLink3URL: https://datasheet.ciiva.com/8033/1734582-8033933.pdf?src-supplier=Element14; ComponentLink3Description: https://datasheet.ciiva.com/8033/1734582-8033933.pdf?src-supplier=Element14; ComponentLink4URL: https://datasheet.ciiva.com/144/mlccorderingcode-144746.pdf?src-supplier=Digi-Key; ComponentLink4Description: https://datasheet.ciiva.com/144/mlccorderingcode-144746.pdf?src-supplier=Digi-Key; ComponentLink5URL: https://datasheet.ciiva.com/144/mlccorderingcode-144747.pdf?src-supplier=Digi-Key; ComponentLink5Description: https://datasheet.ciiva.com/144/mlccorderingcode-144747.pdf?src-supplier=Digi-Key; Supplier 2: Digi-Key; Manufacturer 2: Yageo; Manufacturer Part Number 2: CC0805JRNPO9BN160; Stock 2: 956; Pricing 2: 1=0,15000, 10=0,10700, 50=0,06080, 100=0,05040, 500=0,03536, 1000=0,02927 (USD); Weight: 0.000194oz; ComponentLink6URL: https://datasheet.ciiva.com/13264/upy-gp-np0-16v-to-50v-8-3714-13264491.pdf?src-supplier=Mouser; ComponentLink6Description: https://datasheet.ciiva.com/13264/upy-gp-np0-16v-to-50v-8-3714-13264491.pdf?src-supplier=Mouser; Supplier Part Number 2: 311-4228-1-ND
footprint CAPC200X125X95L50N (Capacitor, Chip; 2.00 mm L X 1.25 mm W X 0.95 mm H body)
pins: 1, 2

## CC0805JRNPO9BN220
designator C?  (value not drawn)
Ceramic capacitor 0805 X7R 22pF 50V; Manufacturer 1: Yageo; Tolerance: 5%; Dielectric: C0G; Value: 22p; Type: Конденсатор; Supplier 1: Digi-Key; Supplier Part Number 1: 311-1103-1-ND; Manufacturer Part Number 1: CC0805JRNPO9BN220; RoHS: Yes; Category: Ceramic Capacitors; Stock 1: 117464; Pricing 1: 1=0,11000, 10=0,07800, 50=0,04280, 100=0,03490, 500=0,02492, 1000=0,01958 (USD); Mount: SMT; Case/Package: 0805; Number of Pins: 2; Case Code (Imperial): 0805; Case Code (Metric): 2012; Dielectric Material: Ceramic; Min Operating Temperature: -55°C; Max Operating Temperature: 125°C; Capacitance: 22pF; Voltage Rating: 50V; Voltage Rating (DC): 50V; Packaging: Tape and Reel; Package Quantity: 1; Termination: SMD/SMT; Resistor Type: Ceramic; Voltage: 50V; Series: CC; Construction: Flat; Length: 2mm; Width: 1.25mm; Height: 0.6mm; Depth: 1.25mm; Thickness: 0.024inch; Radiation Hardening: No; REACH SVHC: No SVHC; Lead Free: Lead Free; RoHS Compliant: Yes; ComponentLink1URL: https://datasheet.ciiva.com/144/mlccorderingcode-144745.pdf?src-supplier=Digi-Key; ComponentLink1Description: https://datasheet.ciiva.com/144/mlccorderingcode-144745.pdf?src-supplier=Digi-Key; ComponentLink2URL: https://datasheet.ciiva.com/8033/1734582-8033931.pdf?src-supplier=Element14; ComponentLink2Description: https://datasheet.ciiva.com/8033/1734582-8033931.pdf?src-supplier=Element14; ComponentLink3URL: https://datasheet.ciiva.com/8033/1734582-8033933.pdf?src-supplier=Element14; ComponentLink3Description: https://datasheet.ciiva.com/8033/1734582-8033933.pdf?src-supplier=Element14; ComponentLink4URL: https://datasheet.ciiva.com/144/mlccorderingcode-144746.pdf?src-supplier=Digi-Key; ComponentLink4Description: https://datasheet.ciiva.com/144/mlccorderingcode-144746.pdf?src-supplier=Digi-Key; ComponentLink5URL: https://datasheet.ciiva.com/144/mlccorderingcode-144747.pdf?src-supplier=Digi-Key; ComponentLink5Description: https://datasheet.ciiva.com/144/mlccorderingcode-144747.pdf?src-supplier=Digi-Key
footprint CAPC200X125X95L50N (Capacitor, Chip; 2.00 mm L X 1.25 mm W X 0.95 mm H body)
pins: 1, 2

## CC0805JRNPO9BN471
designator C?  (value not drawn)
Ceramic capacitor 0805 C0G 470pF 50V; Manufacturer 1: Yageo; Description 1: Surface Mount Ceramic Multilayer Capacitor 0.033uF 20% X7R 50V 0805 Paper T/R; Tolerance: 5%; Temperature Coefficient: 30ppm/°C; Insulation Resistance: 100GR; Value: 470p; Type: Конденсатор; ComponentLink1URL: https://datasheet.ciiva.com/13264/upy-gphc-x7r-6-3v-to-50v-8-12304-13264316.pdf?src-supplier=Mouser; ComponentLink1Description: https://datasheet.ciiva.com/13264/upy-gphc-x7r-6-3v-to-50v-8-12304-13264316.pdf?src-supplier=Mouser; Manufacturer Part Number 1: CC0805JRNPO9BN471; RoHS: Yes; Category: Ceramic Capacitors; Pricing 1: 1=0,13000, 10=0,09500, 50=0,05360, 100=0,04450, 500=0,03118, 1000=0,02581 (USD); RoHS Compliant: Yes; Stock 1: 57327; Mount: SMT; Case/Package: 0805; Material: Ceramic; Case Code (Metric): 2012; Case Code (Imperial): 0805; Dielectric Material: Ceramic; Min Operating Temperature: -55°C; Max Operating Temperature: 125°C; Capacitance: 470pF; Dielectric: C0G; Voltage: 50V; Voltage Rating: 50V; Voltage Rating (DC): 50V; Package Quantity: 4000; Packaging: Tape and Reel; Termination: SMD/SMT; Resistor Type: Ceramic; Series: CC; Length: 2mm; Width: 0.049inch; Height: 0.6mm; Depth: 1.25mm; Thickness: 0.024inch; Radiation Hardening: No; REACH SVHC: Unknown; Lead Free: Lead Free; ComponentLink2URL: https://datasheet.ciiva.com/23768/78251-23768049.pdf?src-supplier=Newark; ComponentLink2Description: https://datasheet.ciiva.com/23768/78251-23768049.pdf?src-supplier=Newark; ComponentLink3URL: https://datasheet.ciiva.com/23768/70712-23768048.pdf?src-supplier=Newark; ComponentLink3Description: https://datasheet.ciiva.com/23768/70712-23768048.pdf?src-supplier=Newark; ComponentLink4URL: https://datasheet.ciiva.com/11786/0900766b80d84fbf-11786134.pdf?src-supplier=RSComponents; ComponentLink4Description: https://datasheet.ciiva.com/11786/0900766b80d84fbf-11786134.pdf?src-supplier=RSComponents; ComponentLink5URL: https://datasheet.ciiva.com/8033/1443161-8033957.pdf?src-supplier=Element14; ComponentLink5Description: https://datasheet.ciiva.com/8033/1443161-8033957.pdf?src-supplier=Element14; ComponentLink6URL: https://datasheet.ciiva.com/145/mlccorderingcode-145011.pdf?src-supplier=Digi-Key; ComponentLink6Description: https://datasheet.ciiva.com/145/mlccorderingcode-145011.pdf?src-supplier=Digi-Key; ComponentLink7URL: https://datasheet.ciiva.com/145/mlccorderingcode-145010.pdf?src-supplier=Digi-Key; ComponentLink7Description: https://datasheet.ciiva.com/145/mlccorderingcode-145010.pdf?src-supplier=Digi-Key; ComponentLink8URL: https://datasheet.ciiva.com/145/mlccorderingcode-145012.pdf?src-supplier=Digi-Key; ComponentLink8Description: https://datasheet.ciiva.com/145/mlccorderingcode-145012.pdf?src-supplier=Digi-Key; ComponentLink9URL: https://datasheet.ciiva.com/8033/1443161-8033959.pdf?src-supplier=Element14; ComponentLink9Description: https://datasheet.ciiva.com/8033/1443161-8033959.pdf?src-supplier=Element14; ComponentLink10URL: https://datasheet.ciiva.com/16625/upy-gp-np0-16v-to-50v-8-16625542.pdf?src-supplier=Avnet+Europe; ComponentLink10Description: https://datasheet.ciiva.com/16625/upy-gp-np0-16v-to-50v-8-16625542.pdf?src-supplier=Avnet+Europe; Supplier 1: Digi-Key; Supplier 2: RSComponents
footprint CAPC200X125X95L50N (Capacitor, Chip; 2.00 mm L X 1.25 mm W X 0.95 mm H body)
pins: 1, 2

## CC0805KKX7R8BB475
designator C?  (value not drawn)
Ceramic capacitor 0805 X7R 4.7uF 25V; Manufacturer 1: Yageo; Tolerance: 10%; Value: 4.7u; Type: Конденсатор; Supplier 1: Digi-Key; Supplier Part Number 1: 311-1885-1-ND; Manufacturer Part Number 1: CC0805KKX7R8BB475; RoHS: Yes; Category: Ceramic Capacitors; Stock 1: 3001; Pricing 1: 1=0,44000, 10=0,30800, 50=0,21560, 100=0,18480, 500=0,13858, 1000=0,11703 (USD); Mount: SMT; Case/Package: 0805; Case Code (Metric): 2012; Case Code (Imperial): 0805; Weight: 0.000194oz; Min Operating Temperature: -55°C; Max Operating Temperature: 125°C; Packaging: Tape and Reel; Capacitance: 4.7uF; Voltage Rating: 25V; Dielectric: X7R; Termination: SMD/SMT; Voltage Rating (DC): 25V; Package Quantity: 3000; Length: 0.079inch; Width: 0.049inch; Thickness: 0.057inch; Lead Free: Lead Free; Halogen Free: Halogen Free; ComponentLink1URL: http://www.mouser.com/ds/2/447/Yageo_UPY-GP_NP0_16V-to-50V_9-358835.pdf?src-supplier=Mouser; ComponentLink1Description: http://www.mouser.com/ds/2/447/Yageo_UPY-GP_NP0_16V-to-50V_9-358835.pdf?src-supplier=Mouser; ComponentLink2URL: http://www.yageo.com/documents/recent/UPY-GPHC_X7R_6.3V-to-50V_18.pdf?src-supplier=Digi-Key; ComponentLink2Description: http://www.yageo.com/documents/recent/UPY-GPHC_X7R_6.3V-to-50V_18.pdf?src-supplier=Digi-Key; Voltage: 25V
footprint CAPC200X125X95L50N (Capacitor, Chip; 2.00 mm L X 1.25 mm W X 0.95 mm H body)
pins: 1, 2

## CC0805KKX7R9BB105
designator C?  Supplier Part Number 2: 311-1886-1-ND  (hidden comment: CC0805KKX7R9BB105)
Ceramic capacitor 0805 X7R 1uF 50V; Tolerance: 10%; Value: 1u; Type: Конденсатор; Supplier 1: Digi-Key; Supplier Part Number 1: 311-4349-1-ND; Supplier 2: Digi-Key; Manufacturer 2: Yageo; Manufacturer Part Number 2: CC0805KKX7R9BB105; RoHS: Yes; Category: Ceramic Capacitors; Stock 2: 48794; Pricing 2: 1=0,26000, 10=0,17900, 50=0,11920, 100=0,10130, 500=0,07152, 1000=0,06257 (USD); Mount: SMT; Case/Package: 0805; Case Code (Imperial): 0805; Case Code (Metric): 2012; Weight: 0.000194oz; Min Operating Temperature: -55°C; Max Operating Temperature: 125°C; Capacitance: 1uF; Dielectric: X7R; Packaging: Tape and Reel; Voltage Rating: 50V; Voltage Rating (DC): 50V; Termination: SMD/SMT; Resistor Type: Ceramic; Series: CC; Construction: Flat; Length: 2mm; Width: 0.049inch; Height: 1.25mm; Thickness: 0.057inch; Depth: 1.25mm; Radiation Hardening: No; Lead Free: Lead Free; Halogen Free: Halogen Free; RoHS Compliant: Yes; ComponentLink1URL: https://datasheet.ciiva.com/13209/upy-gphc-x7r-6-3v-to-50v-8-12304-13209375.pdf?src-supplier=Mouser; ComponentLink1Description: https://datasheet.ciiva.com/13209/upy-gphc-x7r-6-3v-to-50v-8-12304-13209375.pdf?src-supplier=Mouser; Voltage: 50V
footprint CAPC200X125X95L50N (Capacitor, Chip; 2.00 mm L X 1.25 mm W X 0.95 mm H body)
pins: 1, 2

## CC0805KKX7R9BB224
designator C?  (value not drawn)
Cap Ceramic 0.22uF 50V X7R 10% SMD 0805 125C Blister T/R; Manufacturer 1: Yageo; Manufacturer Part Number 1: CC0805MRX7R9BB104; Tolerance: 20%; Capacitance: 100nF; Value: 0.22u; Type: Конденсатор; Supplier 1: Digi-Key; Supplier Part Number 1: 311-4351-1-ND; RoHS: Yes; Category: Ceramic Capacitors; Stock 1: 29978; Pricing 1: 1=0,15000, 10=0,10700, 50=0,06080, 100=0,05040, 500=0,03536, 1000=0,02927 (USD); Mount: SMT; Case/Package: 0805; Min Operating Temperature: -55°C; Max Operating Temperature: 125°C; Packaging: Tape and Reel; Dielectric: X7R; Voltage Rating: 50V; Voltage Rating (DC): 50V; Series: CC; Length: 0.079inch; Width: 0.049inch; Thickness: 0.037inch; Depth: 1.25mm; Lead Free: Lead Free; Halogen Free: Halogen Free; RoHS Compliant: Yes; ComponentLink1URL: https://datasheet.ciiva.com/13207/upy-gphc-x7r-6-3v-to-50v-8-12304-13207535.pdf?src-supplier=Mouser; ComponentLink1Description: https://datasheet.ciiva.com/13207/upy-gphc-x7r-6-3v-to-50v-8-12304-13207535.pdf?src-supplier=Mouser; Case Code (Imperial): 0805; Case Code (Metric): 2012; Voltage: 50V; Supplier 2: RSComponents; Supplier Part Number 2: 1988114; Manufacturer 2: Yageo; Manufacturer Part Number 2: CC0805KKX7R9BB224; RoHS 2: Yes; Stock 2: 2500; Pricing 2: 100=7,90600, 500=6,95100, 1500=6,13400 (RUB); Weight: 0.000194oz; Termination: SMD/SMT; Resistor Type: Ceramic; Construction: Flat; Height: 1.25mm; Radiation Hardening: No; ComponentLink2URL: https://datasheet.ciiva.com/26862/getdatasheetpartid-403679-26862968.pdf?src-supplier=Verical; ComponentLink2Description: https://datasheet.ciiva.com/26862/getdatasheetpartid-403679-26862968.pdf?src-supplier=Verical; ComponentLink3URL: https://datasheet.ciiva.com/15375/yageo-486313-494411-15375807.pdf?src-supplier=Mouser; ComponentLink3Description: https://datasheet.ciiva.com/15375/yageo-486313-494411-15375807.pdf?src-supplier=Mouser
footprint CAPC200X125X95L50N (Capacitor, Chip; 2.00 mm L X 1.25 mm W X 0.95 mm H body)
pins: 1, 2

## CC0805KKX7R9BB225
designator C?  Supplier Part Number 2: 311-3420-6-ND  (hidden comment: CC0805KKX7R9BB225)
Ceramic capacitor 0805 X7R 2.2uF 50V; Tolerance: 10%; Value: 2.2u; Type: Конденсатор; Supplier 1: Avnet; Supplier Part Number 1: CC0805KKX7R9BB225; Supplier 2: Digi-Key; Manufacturer 2: Yageo; Manufacturer Part Number 2: CC0805KKX7R9BB225; RoHS: Yes; Category: Ceramic Capacitors; Pricing 2: 1=0,41000, 10=0,28800, 50=0,20120, 100=0,17250, 500=0,12938, 1000=0,10925 (USD); Mount: SMT; Case/Package: 0805; Case Code (Imperial): 0805; Case Code (Metric): 2012; Weight: 0.000194oz; Min Operating Temperature: -55°C; Max Operating Temperature: 125°C; Packaging: Tape and Reel; Capacitance: 2.2uF; Voltage Rating: 50V; Dielectric: X7R; Termination: SMD/SMT; Voltage Rating (DC): 50V; Package Quantity: 3000; Length: 0.079inch; Width: 0.049inch; Thickness: 0.057inch; Lead Free: Lead Free; Halogen Free: Halogen Free; RoHS Compliant: Yes; ComponentLink1URL: http://www.mouser.com/ds/2/447/Yageo_UPY-GP_NP0_16V-to-50V_9-358835.pdf?src-supplier=Mouser; ComponentLink1Description: http://www.mouser.com/ds/2/447/Yageo_UPY-GP_NP0_16V-to-50V_9-358835.pdf?src-supplier=Mouser; ComponentLink2URL: http://www.yageo.com/documents/recent/UPY-GPHC_X7R_6.3V-to-50V_18.pdf?src-supplier=Digi-Key; ComponentLink2Description: http://www.yageo.com/documents/recent/UPY-GPHC_X7R_6.3V-to-50V_18.pdf?src-supplier=Digi-Key; ComponentLink3URL: http://www.yageo.com/documents/recent/UPY-GPHC_X7R_6.3V-to-50V_16.pdf?src-supplier=Digi-Key; ComponentLink3Description: http://www.yageo.com/documents/recent/UPY-GPHC_X7R_6.3V-to-50V_16.pdf?src-supplier=Digi-Key; Voltage: 50V
footprint CAPC200X125X95L50N (Capacitor, Chip; 2.00 mm L X 1.25 mm W X 0.95 mm H body)
pins: 1, 2

## CC0805MRX7R9BB101
designator C?  (value not drawn)
Ceramic capacitor 0805 X7R 100pF 50V; Capacitance: 1nF; Tolerance: 20%; Value: 100p; Type: Конденсатор; Supplier 1: Digi-Key; Supplier Part Number 1: 311-4349-1-ND; Supplier 2: Mouser; Manufacturer 2: Yageo; Manufacturer Part Number 2: CC0805MRX7R9BB102; RoHS: Yes; Category: Ceramic Capacitors; Stock 2: 5617; Pricing 2: 1=0,14000, 10=0,08800, 50=0,08800, 100=0,03900, 1000=0,02500, 10000=0,02100 (USD); Mount: SMT; Case/Package: 0805; Min Operating Temperature: -55°C; Max Operating Temperature: 125°C; Packaging: Tape and Reel; Voltage Rating (DC): 50V; Dielectric: X7R; Resistor Type: Ceramic; Voltage Rating: 50V; Series: CC; Length: 0.079inch; Width: 0.049inch; Thickness: 0.028inch; Depth: 1.25mm; Lead Free: Lead Free; Halogen Free: Halogen Free; RoHS Compliant: Yes; ComponentLink1URL: http://www.mouser.com/ds/2/447/Yageo_UPY-GP_NP0_16V-to-50V_9-358835.pdf?src-supplier=Mouser; ComponentLink1Description: http://www.mouser.com/ds/2/447/Yageo_UPY-GP_NP0_16V-to-50V_9-358835.pdf?src-supplier=Mouser; ComponentLink2URL: http://components.arrow.com/part/dataview/0323_04166629?src-supplier=Arrow+Europe; ComponentLink2Description: http://components.arrow.com/part/dataview/0323_04166629?src-supplier=Arrow+Europe; ComponentLink3URL: http://www.yageo.com/documents/recent/UPY-GPHC_X7R_6.3V-to-50V_18.pdf?src-supplier=Digi-Key; ComponentLink3Description: http://www.yageo.com/documents/recent/UPY-GPHC_X7R_6.3V-to-50V_18.pdf?src-supplier=Digi-Key; Supplier Part Number 2: 603-CC805MRX7R9BB102; Case Code (Imperial): 0805; Case Code (Metric): 2012; Voltage: 50V
footprint CAPC200X125X95L50N (Capacitor, Chip; 2.00 mm L X 1.25 mm W X 0.95 mm H body)
pins: 1, 2